# EAGLE library part USBC (library C3_SCOUT_REVC)
SHOU HAN TYPE-C 6P / C456012. Power-only 5 V / 3 A, 3000 mating cycles. Matched 0.60 x 1.40 mm native plated-slot footprint; factory assembly.
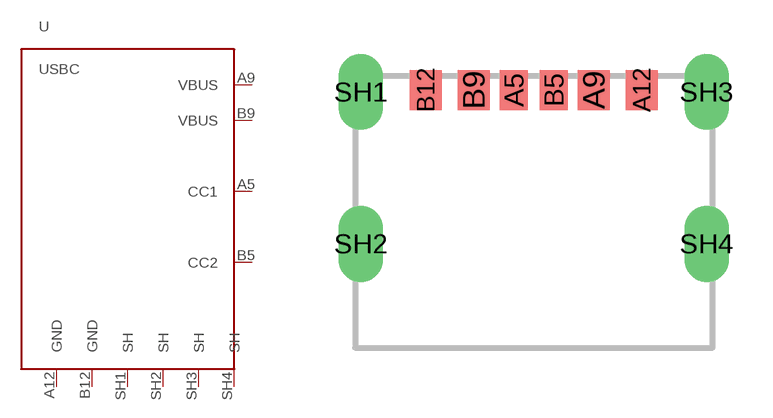
[diagram p6: symbol with the pads of USB-C-SHOUHAN-6P-C456012; footprint USB-C-SHOUHAN-6P-C456012]

Designator prefix U

## USBC (LCSC_PART: C456012; MANUFACTURER: SHOU HAN; MPN: TYPE-C 6P)  [USB-C-SHOUHAN-6P-C456012]
A5  CC1  pas
A9  VBUS  pas
A12  GND  pas
B5  CC2  pas
B9  VBUS  pas
B12  GND  pas
SH1  SH  pas
SH2  SH  pas
SH3  SH  pas
SH4  SH  pas

## Footprint USB-C-SHOUHAN-6P-C456012 (pad centres in mm)
SHOU HAN TYPE-C 6P, JLC C456012. Manufacturer drawing 1006-FGBXXX, 2021-08-02. Four native PTH slots 0.60 x 1.40 mm, copper 1.00 x 1.80 mm. Body 8.94 x 6.80 x 3.26 mm; shell tabs 0.95 mm. Origin at body center; front mouth at Y=-3.4 mm. Datasheet: https://datasheet.lcsc.com/datasheet/pdf/68548ae186bce8dcee36d39654e737cb.pdf?productCode=C456012
smd 0.7 x 1: A5 -0.5,3.05; B5 0.5,3.05
smd 0.8 x 1: A9 1.5,3.05; A12 2.7,3.05; B9 -1.5,3.05; B12 -2.7,3.05
drill 0.6 pad 1 slot 1.4 rotated 90: SH1 -4.32,3; SH2 -4.32,-0.8; SH3 4.32,3; SH4 4.32,-0.8